# Altium integrated library VIETTIEN_2.IntLib: 110 symbols (part 1 of 5)
Pins are listed as number, name and electrical type; pins without a type are passive.

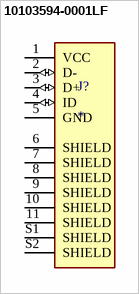
[diagram p0: symbol 10103594-0001LF]

## 10103594-0001LF
designator J?
USB - micro B USB 2.0 Receptacle Connector 5 Position Surface Mount, Right Angle; Through Hole; MF: {'manufacturer': u'Amphenol ICC (FCI)'}; MP: 10103594-0001LF; Package: None; Price: None; Value: *; Availability: Unavailable
footprint AMPHENOL_10103594-0001LF
pins: 1 VCC (power), 2 D- (io), 3 D+ (io), 4 ID (io), 5 GND (power), 6 SHIELD, 7 SHIELD, 8 SHIELD, 9 SHIELD, 10 SHIELD, 11 SHIELD, S1 SHIELD, S2 SHIELD


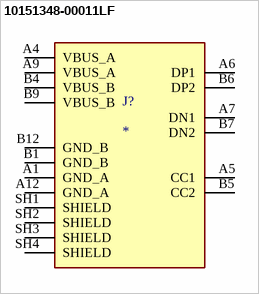
[diagram p1: symbol 10151348-00011LF]

## 10151348-00011LF
designator J?
USB Type C Receptacle T/H 14Pin Upright; MF: Amphenol ICC (FCI); MP: 10151348-00011LF; SnapEDA_Link: https://www.snapeda.com/parts/10151348-00011LF/Amphenol+ICC/view-part/?ref=snap; Package: None; Value: *; Check_prices: https://www.snapeda.com/parts/10151348-00011LF/Amphenol+ICC/view-part/?ref=eda
footprint AMPHENOL_10151348-00011LF
pins: A1 GND_A (power), A4 VBUS_A (power), A5 CC1, A6 DP1, A7 DN1, A9 VBUS_A (power), A12 GND_A (power), B1 GND_B (power), B4 VBUS_B (power), B5 CC2, B6 DP2, B7 DN2, B9 VBUS_B (power), B12 GND_B (power), SH1 SHIELD, SH2 SHIELD, SH3 SHIELD, SH4 SHIELD


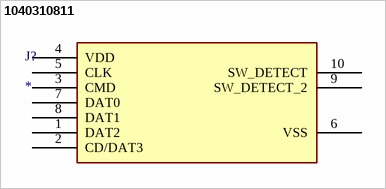
[diagram p2: symbol 1040310811]

## 1040310811
designator J?
MF: {'manufacturer': u'Molex'}; MP: 1040310811; Package: None; Price: None; Value: *; Availability: Unavailable
footprint 104031-0811_MOL
pins: 1 DAT2, 2 CD/DAT3, 3 CMD, 4 VDD (power), 5 CLK, 6 VSS, 7 DAT0, 8 DAT1, 9 SW_DETECT_2, 10 SW_DETECT


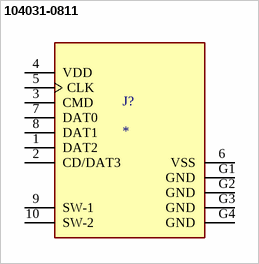
[diagram p3: symbol 104031-0811]

## 104031-0811
designator J?
Surface Mount Micro SD Card Connector, with Push In Termination | Molex Incorporated 104031-0811; SnapEDA_Link: https://www.snapeda.com/parts/104031-0811/Molex/view-part/?ref=snap; Package: None; Value: *; MF: Molex; MP: 104031-0811; Check_prices: https://www.snapeda.com/parts/104031-0811/Molex/view-part/?ref=eda
footprint MOLEX_104031-0811
pins: 1 DAT2, 2 CD/DAT3, 3 CMD, 4 VDD (power), 5 CLK, 6 VSS (power), 7 DAT0, 8 DAT1, 9 SW-1, 10 SW-2, G1 GND (power), G2 GND (power), G3 GND (power), G4 GND (power)


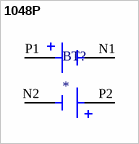
[diagram p4: symbol 1048P]

## 1048P
designator BT?
SMT Polarized Holder for Dual 18650 Batteries; MF: Keystone Electronics; MP: 1048P; Value: *; Price: None; Package: None; Availability: In Stock; SnapEDA_Link: https://www.snapeda.com/parts/1048P/Keystone+Electronics/view-part/?ref=snap; Purchase-URL: https://pricing.snapeda.com/search/part/1048P/?ref=eda; Check_prices: https://www.snapeda.com/parts/1048P/Keystone+Electronics/view-part/?ref=eda
footprint BAT_1048P
pins: N1, N2, P1, P2


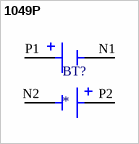
[diagram p5: symbol 1049P]

## 1049P
designator BT?
MF: Keystone Electronics; MP: 1049P; Package: None; Price: None; Value: *; Availability: Unavailable
footprint BAT_1049P
pins: N1 NEG1, N2 NEG2, P1 POS1, P2 POS2


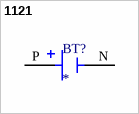
[diagram p6: symbol 1121]

## 1121
designator BT?
THM Holder for 20700 & 21700 Cell w/ coil spring; MF: Keystone Electronics; MP: 1121; SnapEDA_Link: https://www.snapeda.com/parts/1121/Keystone/view-part/?ref=snap; Package: None; Value: *; Check_prices: https://www.snapeda.com/parts/1121/Keystone/view-part/?ref=eda
footprint BAT_1121
pins: N NEG, P POS


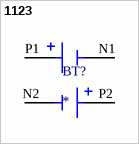
[diagram p7: symbol 1123]

## 1123
designator BT?
THM Dual Holder for 20700 & 21700 Cell w/ coil spring; MF: Keystone Electronics; MP: 1123; SnapEDA_Link: https://www.snapeda.com/parts/1123/Keystone/view-part/?ref=snap; Package: None; Value: *; Check_prices: https://www.snapeda.com/parts/1123/Keystone/view-part/?ref=eda
footprint BAT_1123
pins: N1 NEG1, N2 NEG2, P1 POS1, P2 POS2


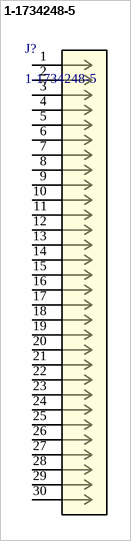
[diagram p8: symbol 1-1734248-5]

## 1-1734248-5
designator J?
1.0 FPC, ZIF V/T, SMT, 15P; Manufacturer_Name: TE Connectivity; TYPE: Receptacle; Copyright: Copyright (C) 2026 Ultra Librarian. All rights reserved.; Manufacturer_Part_Number: 1-1734248-5; RefDes: RefDes
footprint conn30_1-1734248-5_TEC
pins: 1, 2, 3, 4, 5, 6, 7, 8, 9, 10, 11, 12, 13, 14, 15, 16, 17, 18, 19, 20, 21, 22, 23, 24, 25, 26, 27, 28, 29, 30


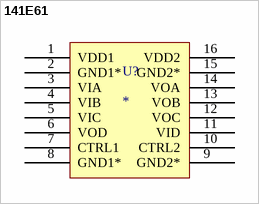
[diagram p9: symbol 141E61]

## 141E61
designator U?
4-Channel Digital Isolator, 3 Forward/1 Reverse, 5kVrms Isolation, SOIC-16 Wide , (300mil), SMD,π141E61
footprint SOIC127P1032X265-16N
pins: 1 VDD1, 2 GND1*, 3 VIA, 4 VIB, 5 VIC, 6 VOD, 7 CTRL1, 8 GND1*, 9 GND2*, 10 CTRL2, 11 VID, 12 VOC, 13 VOB, 14 VOA, 15 GND2*, 16 VDD2


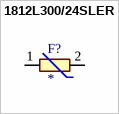
[diagram p10: symbol 1812L300/24SLER]

## 1812L300/24SLER
designator F?
Polymeric PTC Resettable Fuse 24V 3 A Ih Surface Mount 1812 (4532 Metric), Concave; MF: Littelfuse Inc.; MP: 1812L300/24SLER; Check_prices: https://www.snapeda.com/parts/1812L300/24SLER/Littelfuse/view-part/?ref=eda; Availability: In Stock; Price: None; Package: None; Value: *; SnapEDA_Link: https://www.snapeda.com/parts/1812L300/24SLER/Littelfuse/view-part/?ref=snap; Purchase-URL: https://pricing.snapeda.com/search/part/1812L300/24SLER/?ref=eda
footprint FUSSC324X455X250-2N
pins: 1, 2


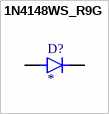
[diagram p11: symbol 1N4148WS_R9G]

## 1N4148WS_R9G
designator D?
150mA, 100V High Speed SMD Switching Diode; MF: Taiwan Semiconductor; MP: 1N4148WS R9G; SnapEDA_Link: https://www.snapeda.com/parts/1N4148WS%20R9G/Taiwan+Semiconductor/view-part/?ref=snap; Package: SOD-323F Taiwan Semiconductor; Value: *; Check_prices: https://www.snapeda.com/parts/1N4148WS%20R9G/Taiwan+Semiconductor/view-part/?ref=eda
footprint DIO_1N4148WS_R9G
pins: A, C K


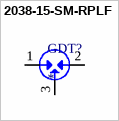
[diagram p12: symbol 2038-15-SM-RPLF]

## 2038-15-SM-RPLF
designator GDT?
Gas Tube, 3 Electr, 150V, 10kA, 5 mm, SMT, Reel pack, 2038 Series | Bourns 2038-15-SM-RPLF; MP: 2031-42T-SM-RPLF; SnapEDA_Link: https://www.snapeda.com/parts/2031-42T-SM-RPLF/Bourns/view-part/?ref=snap; Package: None; Value: *; MF: Bourns; Check_prices: https://www.snapeda.com/parts/2031-42T-SM-RPLF/Bourns/view-part/?ref=eda
footprint TVS_2031-42T-SM-RPLF
pins: 1, 2, 3


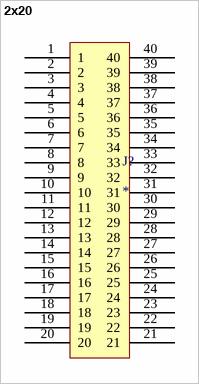
[diagram p13: symbol 2x20]

## 2x20
designator J?
40-pin dual-row male header, 2×20 configuration, 2.54mm pitch, through-hole mounting
footprint 2x40
pins: 1, 2, 3, 4, 5, 6, 7, 8, 9, 10, 11, 12, 13, 14, 15, 16, 17, 18, 19, 20, 21, 22, 23, 24, 25, 26, 27, 28, 29, 30, 31, 32, 33, 34, 35, 36, 37, 38, 39, 40


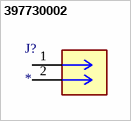
[diagram p14: symbol 397730002]

## 397730002
designator J?
2 Position Wire to Board Terminal Block Horizontal with Board 0.100 (2.54mm) Through Hole; MF: Molex; MP: 397730002; SnapEDA_Link: https://www.snapeda.com/parts/397730002/Molex/view-part/?ref=snap; Package: None; Value: *; Check_prices: https://www.snapeda.com/parts/397730002/Molex/view-part/?ref=eda
footprint CONN_39773-0002_MOL
pins: 1, 2


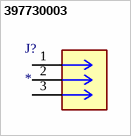
[diagram p15: symbol 397730003]

## 397730003
designator J?
3 Position Wire to Board Terminal Block Horizontal with Board 0.100 (2.54mm) Through Hole; MF: Molex; MP: 0397730003; SnapEDA_Link: https://www.snapeda.com/parts/0397730003/Molex/view-part/?ref=snap; Package: None; Value: *; Check_prices: https://www.snapeda.com/parts/0397730003/Molex/view-part/?ref=eda
footprint CONN_39773-0003_MOL
pins: 1, 2, 3


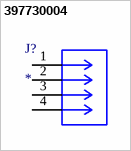
[diagram p16: symbol 397730004]

## 397730004
designator J?
4 Position Wire to Board Terminal Block Horizontal with Board 0.100 (2.54mm) Through Hole; MF: Molex; MP: 397730004; SnapEDA_Link: https://www.snapeda.com/parts/397730004/Molex/view-part/?ref=snap; Package: None; Value: *; Check_prices: https://www.snapeda.com/parts/397730004/Molex/view-part/?ref=eda
footprint CONN_SD-39773-001_04P_MOL
pins: 1, 2, 3, 4


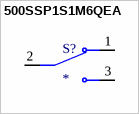
[diagram p17: symbol 500SSP1S1M6QEA]

## 500SSP1S1M6QEA
designator S?
Slide Switch, 500A Series, DPDT, ON-ON, 5A, 120VAC/28VDC, Silver, R/A PC Pin | E-Switch 500SSP1S1M6QEA; SnapEDA_Link: https://www.snapeda.com/parts/500SSP1S1M6QEA/E-Switch/view-part/?ref=snap; Package: None; Value: *; MF: E-Switch; MP: 500SSP1S1M6QEA; Check_prices: https://www.snapeda.com/parts/500SSP1S1M6QEA/E-Switch/view-part/?ref=eda
footprint SW_500SSP1S1M6QEA
pins: 1 NC, 2 COM, 3 NO


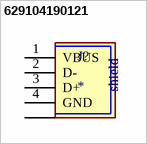
[diagram p18: symbol 629104190121]

## 629104190121
designator J?
MF: {'manufacturer': u'W\xfcrth Elektronik'}; MP: 629104190121; Package: None; Price: None; Value: *; Availability: Unavailable
footprint 629104190121
pins: 1 VBUS, 2 D-, 3 D+, 4 GND, S1 SHIELD, S2 SHIELD, S3 SHIELD, S4 SHIELD
text: shield


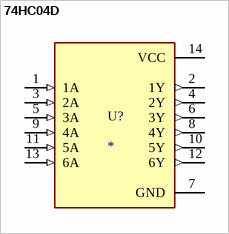
[diagram p19: symbol 74HC04D]

## 74HC04D
designator U?
Hex Inverters; MF: TAEJIN; MP: 74HC04D; SnapEDA_Link: https://www.snapeda.com/parts/74HC04D/TAEJIN/view-part/?ref=snap; Package: SOP-14 TAEJIN; Value: *; Check_prices: https://www.snapeda.com/parts/74HC04D/TAEJIN/view-part/?ref=eda
footprint SOP127P600X170-14N
pins: 1 1A (in), 2 1Y (out), 3 2A (in), 4 2Y (out), 5 3A (in), 6 3Y (out), 7 GND (power), 8 4Y (out), 9 4A (in), 10 5Y (out), 11 5A (in), 12 6Y (out), 13 6A (in), 14 VCC (power)


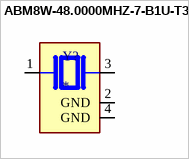
[diagram p20: symbol ABM8W-48.0000MHZ-7-B1U-T3]

## ABM8W-48.0000MHZ-7-B1U-T3
designator Y?
MF: {'manufacturer': u'Abracon LLC'}; MP: ABM8W-48.0000MHZ-7-B1U-T3; Package: None; Price: None; Value: *; Availability: Unavailable
footprint XTAL_ABM8W-48.0000MHZ-7-B1U-T3
pins: 1, 2 GND (power), 3 2, 4 GND (power)


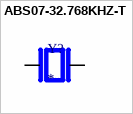
[diagram p21: symbol ABS07-32.768KHZ-T]

## ABS07-32.768KHZ-T
designator Y?
32.768 kHz Â±20ppm Crystal 12.5pF 70 kOhms 2-SMD, No Lead; MP: ABS07-32.768KHZ-T; MF: Abracon; Availability: In Stock; SnapEDA_Link: https://www.snapeda.com/parts/ABS07-32.768KHZ-T/Abracon+LLC/view-part/?ref=snap; Price: None; Value: *; Check_prices: https://www.snapeda.com/parts/ABS07-32.768KHZ-T/Abracon+LLC/view-part/?ref=eda; Purchase-URL: https://pricing.snapeda.com/search/part/ABS07-32.768KHZ-T/?ref=eda; Package: SMD-2 Abracon LLC
footprint XTAL_ABS07-32.768KHZ-T
pins: 1, 2


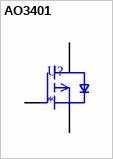
[diagram p22: symbol AO3401]

## AO3401
designator U?
P-Channel 30 V 4A (Ta) 1.4W (Ta) Surface Mount SOT-23-3; MF: Alpha & Omega Semiconductor; MP: AO3401; SnapEDA_Link: https://www.snapeda.com/parts/AO3401/Alpha/view-part/?ref=snap; Package: SOT-23-3 Alpha &amp; Omega Semiconductor; Value: *; Check_prices: https://www.snapeda.com/parts/AO3401/Alpha/view-part/?ref=eda
footprint SOT23-3
pins: 1 G, 2 S, 3 D
